# Altium footprint library CONNFLY_DS1037_01_09F.PcbLib: 1 footprints
Each footprint in its own frame and in the unit in brackets; x right, y up, seen from the top. Pads: shape width x height; smd on the part's side, far side on the other; paste and mask are expansions set on the pad; w line width, h text height; cw(c..) or ccw(c..) is an arc to the next point about the centre after c.
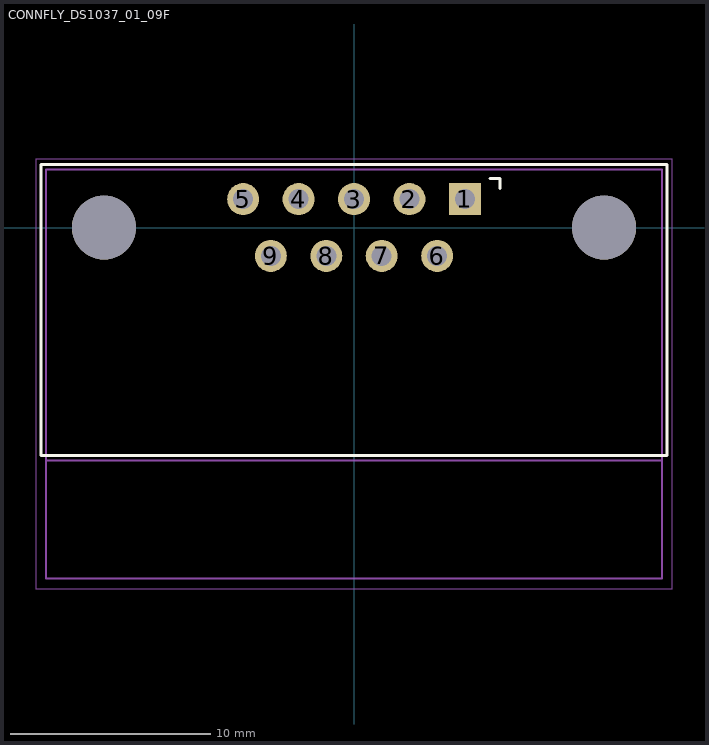
[diagram p0: the footprint, top view; thin cyan lines are the x and y axes]

## CONNFLY_DS1037_01_09F [mm] "CONNFLY DS1037-01-09F female right angle 9.4mm; PTH1.0 pads1.6 pitch2.77x2.84; NPTH3.2 spacing24.99; user STEP"
height 12.5
pads (11):
  rect 1.6x1.6 hole 1 paste+0 mask+0.05: 1(5.54,1.42)
  round 1.6 hole 1 paste+0 mask+0.05: 2(2.77,1.42) 3(0,1.42) 4(-2.77,1.42) 5(-5.54,1.42) 6(4.155,-1.42) 7(1.385,-1.42) 8(-1.385,-1.42) 9(-4.155,-1.42)
  round 3.2 hole 3.2 unplated paste+0 mask+0.05: ""(-12.495,0) ""(12.495,0)
Top Overlay:
  lines w0.15: 6.8,2.45 7.3,2.45 7.3,1.95 ; -15.65,-11.39 15.65,-11.39 15.65,3.15 -15.65,3.15 -15.65,-11.39
Mechanical 1:
  lines w0.1: -15.4,-11.64 15.4,-11.64 ; -15.4,-17.54 15.4,-17.54 15.4,2.9 -15.4,2.9 -15.4,-17.54
Mechanical 15:
  lines w0.05: -15.9,-18.04 15.9,-18.04 15.9,3.4 -15.9,3.4 -15.9,-18.04
3D body "DS1037-01-09FNAKT74.stp": height 12.5, standoff 0, extent -15.4,-17.49 15.4,2.76